# Altium footprint library MIC5365-1P2YMT-TZ.PcbLib: 1 footprints
Each footprint in its own frame and in the unit in brackets; x right, y up, seen from the top. Pads: shape width x height; smd on the part's side, far side on the other; paste and mask are expansions set on the pad; w line width, h text height; cw(c..) or ccw(c..) is an arc to the next point about the centre after c.
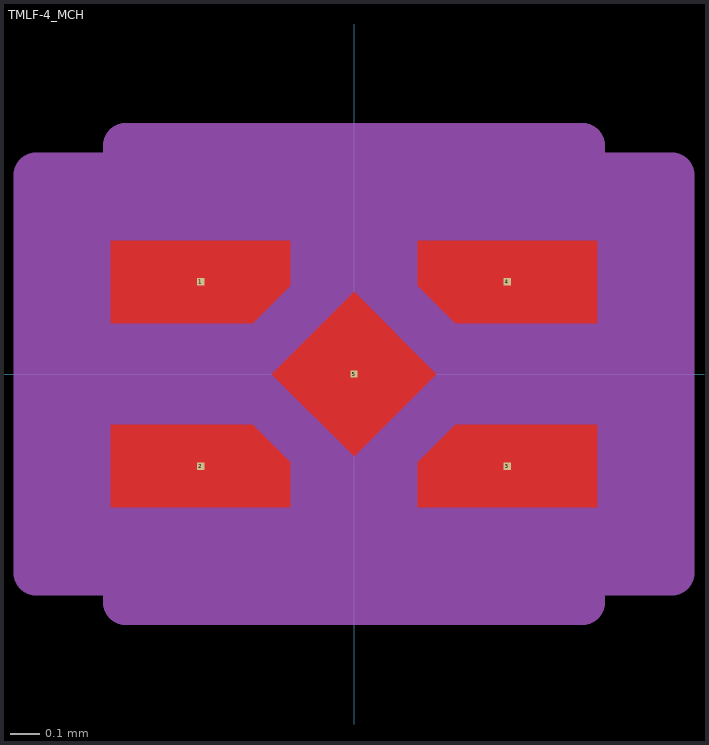
[diagram p0: the footprint, top view; thin cyan lines are the x and y axes]

## TMLF-4_MCH [mil]
pads (5):
  rect 1x1 smd paste+0 mask+0: 1(-20.5,12.3) 2(-20.5,-12.3) 3(20.5,-12.3) 4(20.5,12.3) 5(0,0)
Top Layer:
  region: -8.5,17.8 -32.5,17.8 -32.5,6.8 -13.5,6.8 -8.5,11.8
  region: 8.5,17.8 32.5,17.8 32.5,6.8 13.5,6.8 8.5,11.8
  region: -8.5,-17.8 -32.5,-17.8 -32.5,-6.8 -13.5,-6.8 -8.5,-11.8
  region: 8.5,-17.8 32.5,-17.8 32.5,-6.8 13.5,-6.8 8.5,-11.8
  region: 11,0 0,11 -11,0 0,-11
Top Overlay:
  text ".Designator" at -137.5,-25 h50
Top Paste:
  region: 11,0 0,11 -11,0 0,-11
  region: -8.5,17.8 -32.5,17.8 -32.5,6.8 -13.5,6.8 -8.5,11.8
  region: 8.5,17.8 32.5,17.8 32.5,6.8 13.5,6.8 8.5,11.8
  region: -8.5,-17.8 -32.5,-17.8 -32.5,-6.8 -13.5,-6.8 -8.5,-11.8
  region: 8.5,-17.8 32.5,-17.8 32.5,-6.8 13.5,-6.8 8.5,-11.8
Top Solder:
  region: 8.5,-17.8 32.5,-17.8 32.5,-6.8 13.5,-6.8 8.5,-11.8
  region: -8.5,-17.8 -32.5,-17.8 -32.5,-6.8 -13.5,-6.8 -8.5,-11.8
  region: -8.5,17.8 -32.5,17.8 -32.5,6.8 -13.5,6.8 -8.5,11.8
  region: 8.5,17.8 32.5,17.8 32.5,6.8 13.5,6.8 8.5,11.8
  region: 11,0 0,11 -11,0 0,-11
Mechanical 13:
  circle w1: c-13.5,12.3 r0
  lines w1: -20.5,-20.5 20.5,-20.5 20.5,20.5 -20.5,20.5 -20.5,-20.5
  text ".Designator" at -137.5,-25 h50
Mechanical 15:
  region: -30.5,-26.61 -42.5,-26.61 -42.5,26.61 -30.5,26.61 -30.5,30.5 30.5,30.5 30.5,26.61 42.5,26.61 42.5,-26.61 30.5,-26.61 30.5,-30.5 -30.5,-30.5
  lines w6: -42.5,-26.61 -42.5,26.61 -30.5,26.61 -30.5,30.5 30.5,30.5 30.5,26.61 42.5,26.61 42.5,-26.61 30.5,-26.61 30.5,-30.5 -30.5,-30.5 -30.5,-26.61 -42.5,-26.61